# Altium schematic symbol library Schlib1.SchLib: 23 symbols
Pins are listed as number, name and electrical type; pins without a type are passive.

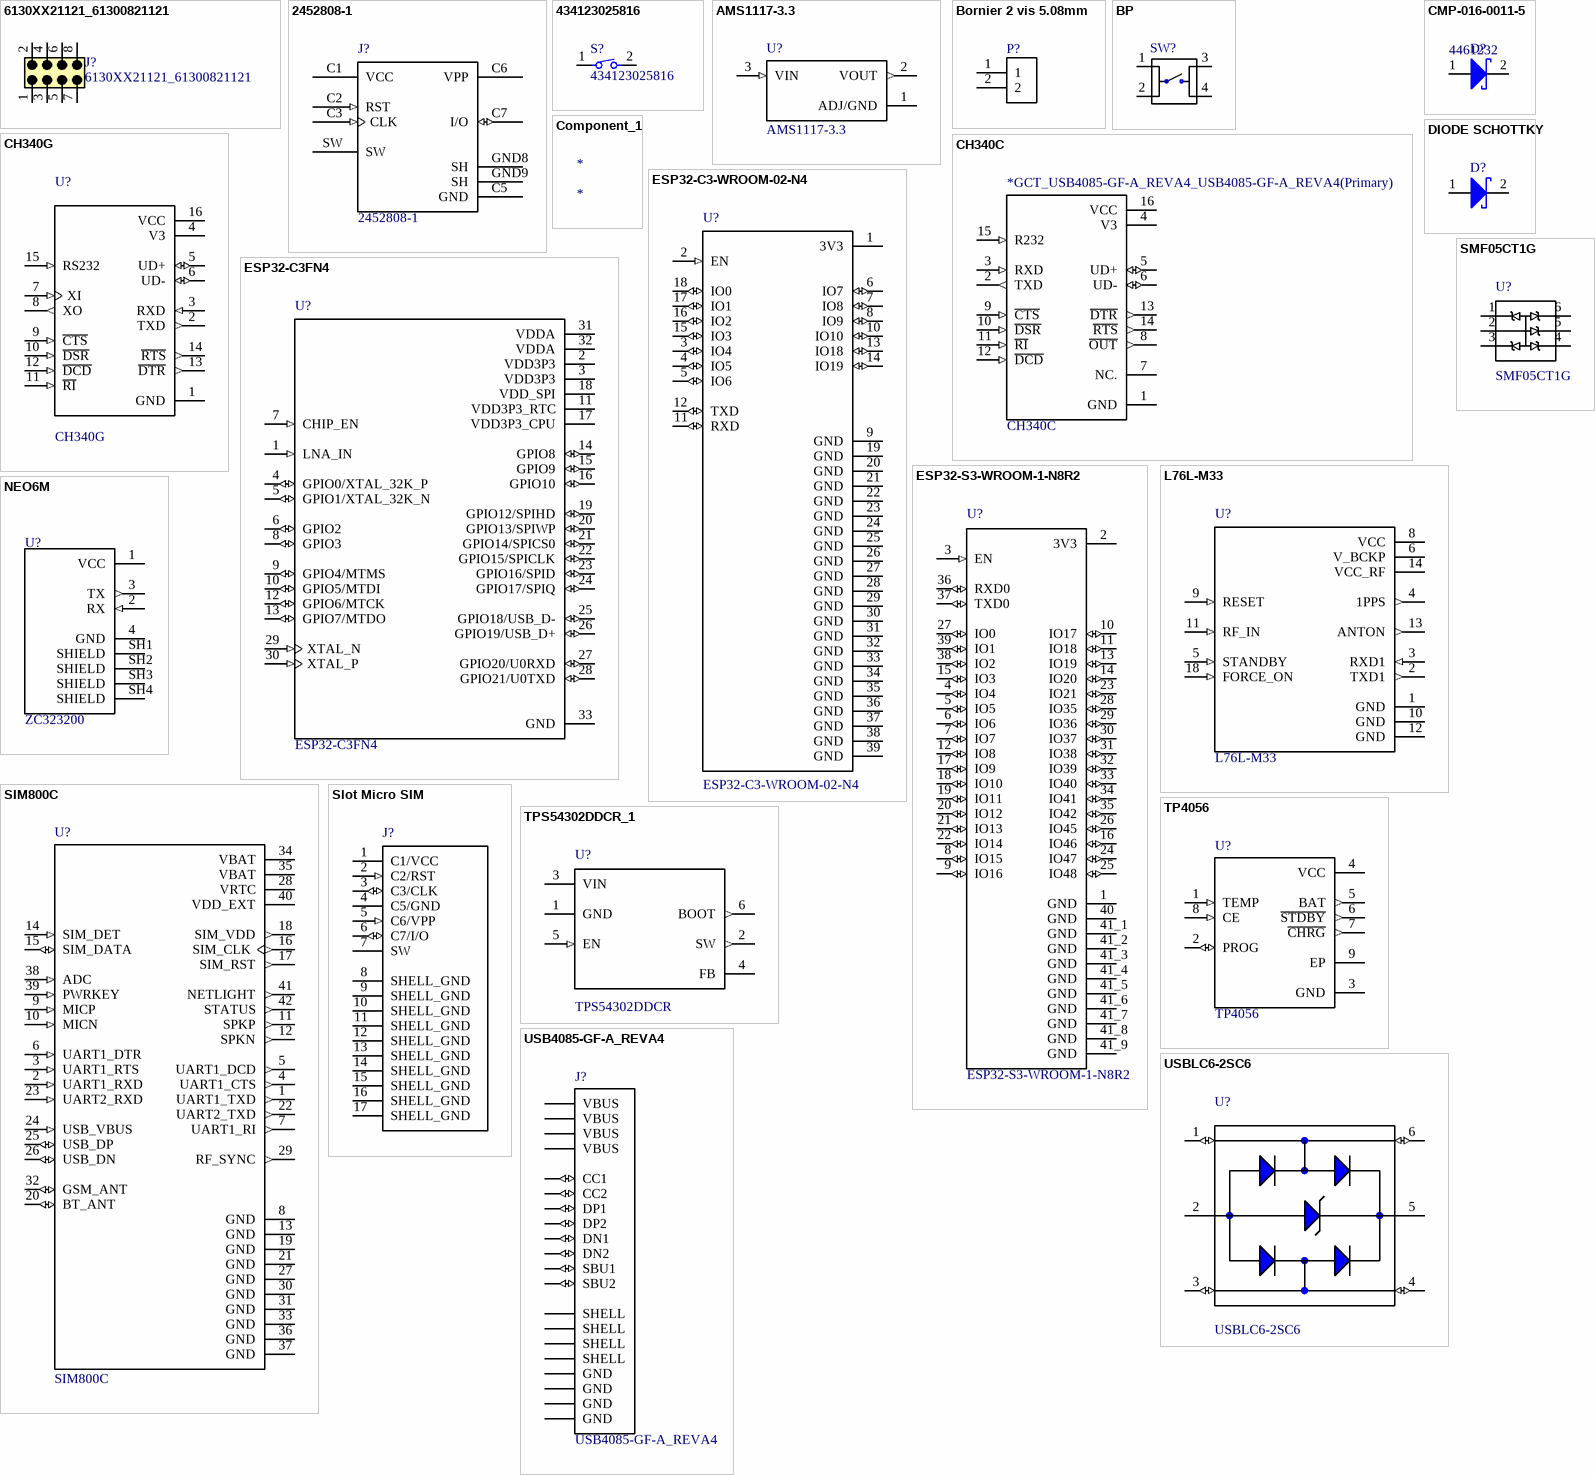
[diagram p0: symbols 6130XX21121_61300821121 to USBLC6-2SC6]

## 6130XX21121_61300821121
designator J?
Connector Header Through Hole 8 position 0.100 (2.54mm); MF: Wurth Electronics; SnapEDA_Link: https://www.snapeda.com/parts/61300821121/Wurth+Electronics/view-part/?ref=snap; Package: None; Value: *; MP: 61300821121; Check_prices: https://www.snapeda.com/parts/61300821121/Wurth+Electronics/view-part/?ref=eda
footprint 61300821121
pins: 1, 2, 3, 4, 5, 6, 7, 8

## 2452808-1
designator J?
8 (6 + 2) Position Card Connector NANO SIM Surface Mount, Right Angle Gold; MF: TE Connectivity; Package: None; Price: None; SnapEDA_Link: https://www.snapeda.com/parts/2452808-1/TE+Connectivity/view-part/?ref=snap; MP: 2452808-1; Availability: In Stock; Check_prices: https://www.snapeda.com/parts/2452808-1/TE+Connectivity/view-part/?ref=eda; Value: *
footprint *TE_2452808-1_2452808-1(Primary)
pins: C1 VCC (power), C2 RST (in), C3 CLK (in), C5 GND (power), C6 VPP, C7 I/O (io), GND8 SH, GND9 SH, SW

## 434123025816
designator S?
Tactile Switch SPST-NO Top Actuated Surface Mount; MF: WÃ¼rth Elektronik; SnapEDA_Link: https://www.snapeda.com/parts/434123025816/W%25C3%25BCrth+Elektronik+Midcom/view-part/?ref=snap; Package: None; Value: *; MP: 434123025816; Check_prices: https://www.snapeda.com/parts/434123025816/W%25C3%25BCrth+Elektronik+Midcom/view-part/?ref=eda
footprint 434123025816
pins: 1, 2

## AMS1117-3.3
designator U?
Linear Voltage Regulator IC Positive Fixed 1 Output 1A SOT-223-3L; MF: UMW; Package: SOT-223-3L UMW; Price: None; SnapEDA_Link: https://www.snapeda.com/parts/AMS1117-3.3/UMW/view-part/?ref=snap; MP: AMS1117-3.3; Availability: In Stock; Check_prices: https://www.snapeda.com/parts/AMS1117-3.3/UMW/view-part/?ref=eda; Value: *
footprint *SOT229P700X180-4N
footprint AMS1117 3.3V
pins: 1 ADJ/GND (power), 2 VOUT (out), 3 VIN (in)

## Bornier 2 vis 5.08mm
designator P?, comment 282837-2  (value not drawn)
Terminal Block Connector Wire Receptacle 2 5.08 mm 30-16 AWG Green 13.5 A 250 V | TE Connectivity 282837-2; MF: TE Connectivity; Package: None; Price: None; Check_prices: https://www.snapeda.com/parts/282837-2/TE+Connectivity+AMP+Connectors/view-part/?ref=eda; SnapEDA_Link: https://www.snapeda.com/parts/282837-2/TE+Connectivity+AMP+Connectors/view-part/?ref=snap; MP: 282837-2; Availability: In Stock; Purchase-URL: https://www.snapeda.com/api/url_track_click_mouser/?unipart_id=2549980&manufacturer=TE Connectivity&part_name=282837-2&search_term=bornier 2 vis 5.08mm; Value: *
footprint *TE_282837-2
pins: 1, 2

## BP
designator SW?, comment 4-1437565-9  (value not drawn)
Alcoswitch, Switch, Tactile, 50 mA, SPST, Pushbutton, Off[On], FSM6JSMA | TE Connectivity FSM6JSMA; Contact_Current_Rating: 50 mA; Configuration_Pole-Throw: Single Pole - Single Throw; MF: TE Connectivity; Package: None; Price: None; SnapEDA_Link: https://www.snapeda.com/parts/FSM6JSMA/TE+Connectivity+Alcoswitch+Switches/view-part/?ref=snap; MP: FSM6JSMA; EU_RoHS_Compliance: Compliant; Availability: In Stock; Check_prices: https://www.snapeda.com/parts/FSM6JSMA/TE+Connectivity+Alcoswitch+Switches/view-part/?ref=eda; Value: *
footprint BP
pins: 1, 2, 3, 4

## CH340C
designator *GCT_USB4085-GF-A_REVA4_USB4085-GF-A_REVA4(Primary)
USB to serial chip CH340; MF: WCH; Package: None; Price: None; SnapEDA_Link: https://www.snapeda.com/parts/CH340C/WCH/view-part/?ref=snap; MP: CH340C; Availability: Not in stock; Check_prices: https://www.snapeda.com/parts/CH340C/WCH/view-part/?ref=eda; Value: *
footprint *SOIC127P600X180-16N
pins: 1 GND (power), 2 TXD (out), 3 RXD (in), 4 V3 (power), 5 UD+ (io), 6 UD- (io), 7 NC., 8 ~{OUT} (out), 9 ~{CTS} (in), 10 ~{DSR} (in), 11 ~{RI} (in), 12 ~{DCD} (in), 13 ~{DTR} (out), 14 ~{RTS} (out), 15 R232 (in), 16 VCC (power)

## CH340G
designator U?
USB Interface Integrated Circuit; MF: WCH; Package: None; Price: None; SnapEDA_Link: https://www.snapeda.com/parts/Ch340G/WCH/view-part/?ref=snap; MP: Ch340G; Availability: Not in stock; Check_prices: https://www.snapeda.com/parts/Ch340G/WCH/view-part/?ref=eda; Value: *
footprint *SOIC127P600X180-16N
pins: 1 GND (power), 2 TXD (out), 3 RXD (in), 4 V3 (power), 5 UD+ (io), 6 UD- (io), 7 XI (in), 8 XO (out), 9 ~{CTS} (in), 10 ~{DSR} (in), 11 ~{RI} (in), 12 ~{DCD} (in), 13 ~{DTR} (out), 14 ~{RTS} (out), 15 RS232 (in), 16 VCC (power)

## CMP-016-0011-5
designator D?, comment Supplier Part Number 1: 4461232  (hidden comment: NSR0320MW2T1G)
DIODE SCHOTTKY 20V 1A  SOD323; Manufacturer 1: ON Semiconductor; Max Forward Surge Current (Ifsm): 5A; Peak Reverse Current: 50uA; Forward Voltage: 500mV; Max Repetitive Reverse Voltage (Vrrm): 23V; Power Dissipation: 200mW; Element Configuration: Single; Height: 0.9mm; Width: 1.35mm; Min Operating Temperature: -55°C; Number of Pins: 2; Package Quantity: 3000; REACH SVHC: No SVHC; Case/Package: SOD-323-2; Max Reverse Leakage Current: 50uA; Max Reverse Voltage (DC): 20V; Lead Free: Lead Free; Radiation Hardening: No; Contact Plating: Tin,Matte; Length: 1.8mm; Max Operating Temperature: 125°C; Forward Current: 1A; Average Rectified Current: 1A; Packaging: Tape and Reel; Supplier 1: Future Electronics; Manufacturer Part Number 1: NSR0320MW2T1G; Stock 1: 0; Pricing 1: 3000=0,05860, 9000=0,04850, 12000=0,04820, 30000=0,04730, 45000=0,04690 (USD); RoHS: Yes; Max Reverse Current: 50uA; Series: -; RoHS Compliant: Yes; ComponentLink1URL: https://datasheet.ciiva.com/22659/1708337-22659115.pdf?src-supplier=Element14; ComponentLink1Description: https://datasheet.ciiva.com/22659/1708337-22659115.pdf?src-supplier=Element14
footprint SOD-323
pins: 1 A, 2 K

## Component_1
designator *

## DIODE SCHOTTKY
designator D?, comment NSR0320MW2T1G  (value not drawn)
DIODE SCHOTTKY 20V 1A  SOD323 / CMP-016-0011-6; Max Forward Surge Current (Ifsm): 5A; Peak Reverse Current: 50uA; Forward Voltage: 500mV; Max Repetitive Reverse Voltage (Vrrm): 23V; Power Dissipation: 200mW; Element Configuration: Single; Height: 0.9mm; Width: 1.35mm; Min Operating Temperature: -55°C; Number of Pins: 2; Package Quantity: 3000; REACH SVHC: No SVHC; Case/Package: SOD-323-2; Max Reverse Leakage Current: 50uA; Max Reverse Voltage (DC): 20V; Lead Free: Lead Free; Radiation Hardening: No; Contact Plating: Tin,Matte; Length: 1.8mm; Max Operating Temperature: 125°C; Forward Current: 1A; Average Rectified Current: 1A; Packaging: Tape and Reel
footprint SOD-323
pins: 1 A, 2 K

## ESP32-C3-WROOM-02-N4
designator U?
WiFi Modules (802.11) (Engineering Samples) SMD module, ESP32-C3, 4MB SPI flash, PCB antenna, -40 C +85 C; MF: Espressif Systems; Package: Package; Price: None; Check_prices: https://www.snapeda.com/parts/ESP32-C3-WROOM-02-N4/Espressif+Systems/view-part/?ref=eda; SnapEDA_Link: https://www.snapeda.com/parts/ESP32-C3-WROOM-02-N4/Espressif+Systems/view-part/?ref=snap; MP: ESP32-C3-WROOM-02-N4; Availability: In Stock; Purchase-URL: https://www.snapeda.com/api/url_track_click_mouser/?unipart_id=5683419&manufacturer=Espressif Systems&part_name=ESP32-C3-WROOM-02-N4&search_term=esp32-c3-wroom-02; Value: *
footprint *MODULE_ESP32-C3-WROOM-02-H4
pins: 1 3V3 (power), 2 EN (in), 3 IO4 (io), 4 IO5 (io), 5 IO6 (io), 6 IO7 (io), 7 IO8 (io), 8 IO9 (io), 9 GND (power), 10 IO10 (io), 11 RXD (io), 12 TXD (io), 13 IO18 (io), 14 IO19 (io), 15 IO3 (io), 16 IO2 (io), 17 IO1 (io), 18 IO0 (io), 19 GND (power), 20 GND (power), 21 GND (power), 22 GND (power), 23 GND (power), 24 GND (power), 25 GND (power), 26 GND (power), 27 GND (power), 28 GND (power), 29 GND (power), 30 GND (power), 31 GND (power), 32 GND (power), 33 GND (power), 34 GND (power), 35 GND (power), 36 GND (power), 37 GND (power), 38 GND (power), 39 GND (power)

## ESP32-C3FN4
designator U?
Bluetooth, WiFi 802.11b/g/n, Bluetooth v5.0 Transceiver Module 2.402GHz ~ 2.48GHz Antenna Not Included Surface Mount; MF: Espressif Systems; Package: VFQFN-32 Espressif Systems; Price: None; Check_prices: https://www.snapeda.com/parts/ESP32-C3FN4/Espressif+Systems/view-part/?ref=eda; SnapEDA_Link: https://www.snapeda.com/parts/ESP32-C3FN4/Espressif+Systems/view-part/?ref=snap; MP: ESP32-C3FN4; Availability: In Stock; Purchase-URL: https://www.snapeda.com/api/url_track_click_mouser/?unipart_id=5845703&manufacturer=Espressif Systems&part_name=ESP32-C3FN4&search_term=esp32-c3fn4; Value: *
footprint ESP32-C3FN4 (*QFN50P500X500X90-33N)
pins: 1 LNA_IN (in), 2 VDD3P3 (power), 3 VDD3P3 (power), 4 GPIO0/XTAL_32K_P (io), 5 GPIO1/XTAL_32K_N (io), 6 GPIO2 (io), 7 CHIP_EN (in), 8 GPIO3 (io), 9 GPIO4/MTMS (io), 10 GPIO5/MTDI (io), 11 VDD3P3_RTC (power), 12 GPIO6/MTCK (io), 13 GPIO7/MTDO (io), 14 GPIO8 (io), 15 GPIO9 (io), 16 GPIO10 (io), 17 VDD3P3_CPU (power), 18 VDD_SPI (power), 19 GPIO12/SPIHD (io), 20 GPIO13/SPIWP (io), 21 GPIO14/SPICS0 (io), 22 GPIO15/SPICLK (io), 23 GPIO16/SPID (io), 24 GPIO17/SPIQ (io), 25 GPIO18/USB_D- (io), 26 GPIO19/USB_D+ (io), 27 GPIO20/U0RXD (io), 28 GPIO21/U0TXD (io), 29 XTAL_N (in), 30 XTAL_P (in), 31 VDDA (power), 32 VDDA (power), 33 GND (power)

## ESP32-S3-WROOM-1-N8R2
designator U?
WiFi 802.11a/b/g/n, Bluetooth v5.0 Transceiver Module 2.4GHz Antenna Not Included -; MF: Espressif Systems; Package: NON STANDARD Espressif Systems; Price: None; SnapEDA_Link: https://www.snapeda.com/parts/ESP32-S3-WROOM-1-N8R2/Espressif+Systems/view-part/?ref=snap; MP: ESP32-S3-WROOM-1-N8R2; Availability: In Stock; Check_prices: https://www.snapeda.com/parts/ESP32-S3-WROOM-1-N8R2/Espressif+Systems/view-part/?ref=eda; Value: *
footprint *XCVR_ESP32-S3-WROOM-1-N8R2_ESP32-S3-WROOM-1-N8R2(Primary)
pins: 1 GND (power), 2 3V3 (power), 3 EN (in), 4 IO4 (io), 5 IO5 (io), 6 IO6 (io), 7 IO7 (io), 8 IO15 (io), 9 IO16 (io), 10 IO17 (io), 11 IO18 (io), 12 IO8 (io), 13 IO19 (io), 14 IO20 (io), 15 IO3 (io), 16 IO46 (io), 17 IO9 (io), 18 IO10 (io), 19 IO11 (io), 20 IO12 (io), 21 IO13 (io), 22 IO14 (io), 23 IO21 (io), 24 IO47 (io), 25 IO48 (io), 26 IO45 (io), 27 IO0 (io), 28 IO35 (io), 29 IO36 (io), 30 IO37 (io), 31 IO38 (io), 32 IO39 (io), 33 IO40 (io), 34 IO41 (io), 35 IO42 (io), 36 RXD0 (io), 37 TXD0 (io), 38 IO2 (io), 39 IO1 (io), 40 GND (power), 41_1 GND (power), 41_2 GND (power), 41_3 GND (power), 41_4 GND (power), 41_5 GND (power), 41_6 GND (power), 41_7 GND (power), 41_8 GND (power), 41_9 GND (power)

## L76L-M33
designator U?
L76-L is a concurrent receiver module integrating GPS, GLONASS, Galileo and QZSS systems. With 33 tracking channels, 99 acquisition channels and 210 PRN channels, L76-L can acquire and track any mix of GPS, GLONASS and SBAS signals. Designed to be compatible with Quectel L76 module in the compact and unified form factor, L76-L provides a built-in LNA for better performance in weak signal areas.; MF: Quectel; Package: Custom Quectel; Price: None; Check_prices: https://www.snapeda.com/parts/L76L-M33/Quectel/view-part/?ref=eda; SnapEDA_Link: https://www.snapeda.com/parts/L76L-M33/Quectel/view-part/?ref=snap; MP: L76L-M33; Availability: In Stock; Purchase-URL: https://www.snapeda.com/api/url_track_click_mouser/?unipart_id=681456&manufacturer=Quectel&part_name=L76L-M33&search_term= l76l-m33; Value: *
footprint *XCVR_L76L-M33
pins: 1 GND (power), 2 TXD1 (out), 3 RXD1 (in), 4 1PPS (out), 5 STANDBY (in), 6 V_BCKP (power), 8 VCC (power), 9 RESET (in), 10 GND (power), 11 RF_IN (in), 12 GND (power), 13 ANTON (out), 14 VCC_RF (power), 18 FORCE_ON (in)

## NEO6M
designator U?, comment ZC323200
GY-NEO6MV2 GY-GPS6MV2 NEO-6M GPS Module with Flight Control APM2.5; MF: YKS; Package: None; Price: None; SnapEDA_Link: https://www.snapeda.com/parts/ZC323200/YKS/view-part/?ref=snap; MP: ZC323200; Availability: Not in stock; Check_prices: https://www.snapeda.com/parts/ZC323200/YKS/view-part/?ref=eda; Value: *
footprint NEO6M (*XCVR_ZC323200_ZC323200(Primary))
pins: 1 VCC (power), 2 RX (in), 3 TX (out), 4 GND (power), SH1 SHIELD, SH2 SHIELD, SH3 SHIELD, SH4 SHIELD

## SIM800C
designator U?
Module: GSM/Bluetooth; GPRS; 2G; 1800MHz, 900MHz; 85.6kbps; SMD; MF: Simcom; Package: None; Price: None; SnapEDA_Link: https://www.snapeda.com/parts/SIM800C/SIMCom/view-part/?ref=snap; MP: SIM800C; Availability: In Stock; Check_prices: https://www.snapeda.com/parts/SIM800C/SIMCom/view-part/?ref=eda; Value: *
footprint SIM800C (*LCC110P1570X1760X250-42N)
pins: 1 UART1_TXD (out), 2 UART1_RXD (in), 3 UART1_RTS (in), 4 UART1_CTS (out), 5 UART1_DCD (out), 6 UART1_DTR (in), 7 UART1_RI (out), 8 GND (power), 9 MICP (in), 10 MICN (in), 11 SPKP (out), 12 SPKN (out), 13 GND (power), 14 SIM_DET (in), 15 SIM_DATA (io), 16 SIM_CLK (out), 17 SIM_RST (out), 18 SIM_VDD (out), 19 GND (power), 20 BT_ANT (io), 21 GND (power), 22 UART2_TXD (out), 23 UART2_RXD (in), 24 USB_VBUS (in), 25 USB_DP (io), 26 USB_DN (io), 27 GND (power), 28 VRTC (power), 29 RF_SYNC (out), 30 GND (power), 31 GND (power), 32 GSM_ANT (io), 33 GND (power), 34 VBAT (power), 35 VBAT (power), 36 GND (power), 37 GND (power), 38 ADC (in), 39 PWRKEY (in), 40 VDD_EXT (power), 41 NETLIGHT (out), 42 STATUS (out)

## Slot Micro SIM
designator J?, comment 2822541-1  (value not drawn)
PUSH-PUSH MICRO SIM CONNECTOR; MF: TE Connectivity; Package: None; Price: None; Check_prices: https://www.snapeda.com/parts/2822541-1/TE+Connectivity+AMP+Connectors/view-part/?ref=eda; SnapEDA_Link: https://www.snapeda.com/parts/2822541-1/TE+Connectivity+AMP+Connectors/view-part/?ref=snap; MP: 2822541-1; Availability: In Stock; Purchase-URL: https://www.snapeda.com/api/url_track_click_mouser/?unipart_id=2624949&manufacturer=TE Connectivity&part_name=2822541-1&search_term=slot micro sim; Value: *
footprint Slot Micro SIm
pins: 1 C1/VCC (power), 2 C2/RST (in), 3 C3/CLK (io), 4 C5/GND (power), 5 C6/VPP (in), 6 C7/I/O (io), 7 SW, 8 SHELL_GND (power), 9 SHELL_GND (power), 10 SHELL_GND (power), 11 SHELL_GND (power), 12 SHELL_GND (power), 13 SHELL_GND (power), 14 SHELL_GND (power), 15 SHELL_GND (power), 16 SHELL_GND (power), 17 SHELL_GND (power)

## SMF05CT1G
designator U?
12.5V Clamp 8A (8/20Âµs) Ipp Tvs Diode Surface Mount SC-88/SC70-6/SOT-363; MF: onsemi; Package: SC-88-6 ON Semiconductor; Price: None; Check_prices: https://www.snapeda.com/parts/SMF05CT1G/Onsemi/view-part/?ref=eda; SnapEDA_Link: https://www.snapeda.com/parts/SMF05CT1G/Onsemi/view-part/?ref=snap; MP: SMF05CT1G; Availability: In Stock; Purchase-URL: https://www.snapeda.com/api/url_track_click_mouser/?unipart_id=7109045&manufacturer=onsemi&part_name=SMF05CT1G&search_term= smf05ct1g; Value: *
footprint *SOT65P210X110-6N
pins: 1 C1, 2 A, 3 C2, 4 C3, 5 C4, 6 C5

## TP4056
designator U?
Complete single cell Li-Ion battery with a constant current / constant voltage linear charger; MF: NanJing Top Power ASIC Corp.; Package: Package; Price: None; SnapEDA_Link: https://www.snapeda.com/parts/TP4056/NanJing+Top+Power+ASIC+Corp./view-part/?ref=snap; MP: TP4056; Availability: Not in stock; Check_prices: https://www.snapeda.com/parts/TP4056/NanJing+Top+Power+ASIC+Corp./view-part/?ref=eda; Value: *
footprint TP4056 (*SOP127P600X175-9N)
pins: 1 TEMP (in), 2 PROG (io), 3 GND (power), 4 VCC (power), 5 BAT (out), 6 ~{STDBY} (out), 7 ~{CHRG} (out), 8 CE (in), 9 EP

## TPS54302DDCR_1
designator U?, comment TPS54302DDCR
4.5-V to 28-V Input, 3-A Output, EMI Friendly Synchronous Step-Down Converter; MF: Texas Instruments; Package: SOT-23-THN-6 Texas Instruments; Price: None; SnapEDA_Link: https://www.snapeda.com/parts/TPS54302DDCR/Texas+Instruments/view-part/?ref=snap; MP: TPS54302DDCR; Availability: In Stock; Check_prices: https://www.snapeda.com/parts/TPS54302DDCR/Texas+Instruments/view-part/?ref=eda; Value: *
footprint TPS54302DDCR
pins: 1 GND (power), 2 SW (out), 3 VIN (power), 4 FB (power), 5 EN (in), 6 BOOT (out)

## USB4085-GF-A_REVA4
designator J?
USB-C (USB TYPE-C) USB 2.0 Receptacle Connector 24 (16+8 Dummy) Position Through Hole, Right Angle, low cost, 3.46mm profile, 16 pin, horizontal, Top mount; MF: Global Connector Technology; Package: None; Price: None; Check_prices: https://www.snapeda.com/parts/USB4085-GF-A/Global+Connector+Technology/view-part/?ref=eda; SnapEDA_Link: https://www.snapeda.com/parts/USB4085-GF-A/Global+Connector+Technology/view-part/?ref=snap; MP: USB4085-GF-A; Availability: In Stock; Purchase-URL: https://www.snapeda.com/api/url_track_click_mouser/?unipart_id=2780390&manufacturer=Global Connector Technology&part_name=USB4085-GF-A&search_term=usb4085-gf-a; Value: *
footprint Conn Type C 2.0 (*GCT_USB4085-GF-A_REVA4_USB4085-GF-A_REVA4(Primary))
pins: A1 GND (power), A4 VBUS (power), A5 CC1 (io), A6 DP1 (io), A7 DN1 (io), A8 SBU1 (io), A9 VBUS (power), A12 GND (power), B1 GND (power), B4 VBUS (power), B5 CC2 (io), B6 DP2 (io), B7 DN2 (io), B8 SBU2 (io), B9 VBUS (power), B12 GND (power), S1 SHELL, S2 SHELL, S3 SHELL, S4 SHELL

## USBLC6-2SC6
designator U?
17V Clamp 5A (8/20Âµs) Ipp Tvs Diode Surface Mount SOT-23-6; MF: STMicroelectronics; Package: SOT-23-6 STMicroelectronics; Price: None; SnapEDA_Link: https://www.snapeda.com/parts/USBLC6-2SC6/STMicroelectronics/view-part/?ref=snap; MP: USBLC6-2SC6; Availability: In Stock; Check_prices: https://www.snapeda.com/parts/USBLC6-2SC6/STMicroelectronics/view-part/?ref=eda; Value: *
footprint USBLC6-2SC6 (*SOT95P280X145-6N)
pins: 1 I/O1_IN (io), 2 GND (power), 3 I/O2_IN (io), 4 I/O2_OUT (io), 5 VBUS (power), 6 I/O1_OUT (io)